# Altium schematic symbol library Janus.SchLib: 15 symbols
Pins are listed as number, name and electrical type; pins without a type are passive.

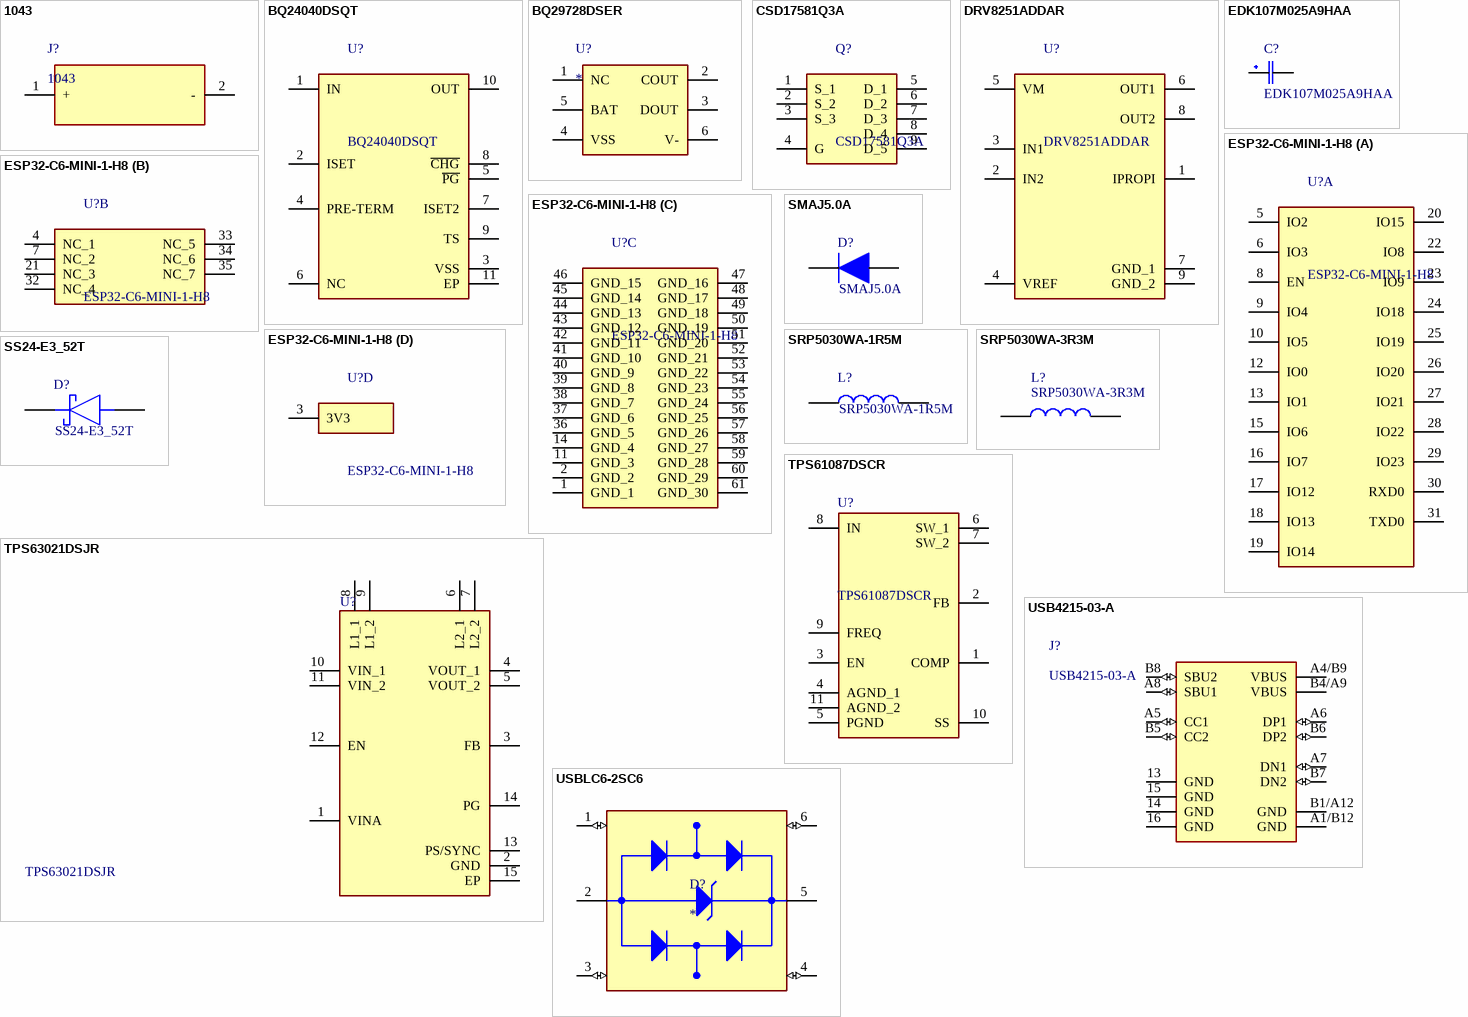
[diagram p0: symbols 1043 to USBLC6-2SC6]

## 1043
designator J?
Description; Manufacturer_Name: Keystone Electronics; Copyright: Copyright (C) 2026 Ultra Librarian. All rights reserved.; Manufacturer_Part_Number: 1043; RefDes: RefDes; Type: Type
footprint 1043_KEY
pins: 1 +, 2 -

## BQ24040DSQT
designator U?
1A 1-Cell Li-Ion Battery Charger WSON10 Texas Instruments BQ24040DSQT, Battery Charge Controller, 1000mA, 10-Pin SON; Geometry.Height: 0.8mm; Mouser Part Number: 595-BQ24040DSQT; Mouser Price/Stock: https://www.mouser.co.uk/ProductDetail/Texas-Instruments/BQ24040DSQT?qs=c7TMWs5treRrgyn%2F898iNQ%3D%3D; Manufacturer_Name: Texas Instruments; Manufacturer_Part_Number: BQ24040DSQT; Datasheet Link: http://www.ti.com/lit/ds/symlink/bq24040.pdf
footprint SON40P200X200X80-11N
pins: 1 IN, 2 ISET, 3 VSS, 4 PRE-TERM, 5 ~{PG}, 6 NC, 7 ISET2, 8 ~{CHG}, 9 TS, 10 OUT, 11 EP

## BQ29728DSER
designator U?
PCM IC; Manufacturer_Name: Texas Instruments; Manufacturer_Part_Number: BQ29707DSET; Datasheet Link: http://www.ti.com/lit/ds/symlink/bq2970.pdf; Height: 0.8mm; Mouser Part Number: 595-BQ29707DSET; Mouser Price/Stock: https://www.mouser.co.uk/ProductDetail/Texas-Instruments/BQ29707DSET?qs=7z%252BmIopC6%2FK8PFHAGER5Bg%3D%3D; Arrow Part Number: BQ29707DSET; Arrow Price/Stock: https://www.arrow.com/en/products/bq29707dset/texas-instruments.html?utm_currency=USD&region=nac
footprint TPS610985DSET
pins: 1 NC, 2 COUT, 3 DOUT, 4 VSS, 5 BAT, 6 V-

## CSD17581Q3A
designator Q?
30-V, N channel NexFET power MOSFET, single SON 3 mm x 3 mm, 4.7 mOhm; Manufacturer_Name: Texas Instruments; Geometry.Height: 0.9mm; Mouser Part Number: 595-CSD17581Q3A; Mouser Price/Stock: https://www.mouser.co.uk/ProductDetail/Texas-Instruments/CSD17581Q3A?qs=%2FP2Ij7fVdhEBu0ceoVBClg%3D%3D; Manufacturer_Part_Number: CSD17581Q3A; Datasheet Link: https://www.ti.com/product/CSD17581Q3A?utm_source=google&utm_medium=cpc&utm_campaign=app-null-null-GPN_EN-cpc-pf-google-soas_en_cons&utm_content=CSD17581Q3A&ds_k=CSD17581Q3A&DCM=yes&gclsrc=aw.ds&gad_source=1&gad_campaignid=8753799319&gbraid=0AAAAAC068F0J1
footprint CSD17581Q3A
pins: 1 S_1, 2 S_2, 3 S_3, 4 G, 5 D_1, 6 D_2, 7 D_3, 8 D_4, 9 D_5

## DRV8251ADDAR
designator U?
Motor Drives 48-V, 3.5-A H bridge motor driver with current regulation and current sense feedback; Manufacturer_Name: Texas Instruments; Geometry.Height: 1.7mm; Mouser Part Number: 595-DRV8251ADDAR; Mouser Price/Stock: https://www.mouser.co.uk/ProductDetail/Texas-Instruments/DRV8251ADDAR?qs=MyNHzdoqoQKQYZTe%252B1jFCw%3D%3D; Manufacturer_Part_Number: DRV8251ADDAR; Datasheet Link: https://www.arrow.com/en/products/drv8251addar/texas-instruments?region=nac
footprint SOIC127P600X170-9N
pins: 1 IPROPI, 2 IN2, 3 IN1, 4 VREF, 5 VM, 6 OUT1, 7 GND_1, 8 OUT2, 9 GND_2

## EDK107M025A9HAA
designator C?
Surface Mount, Aluminum Electrolytic; Manufacturer_Name: Yageo Group; Geometry.Height: 8mm; Mouser Part Number: 80-EDK107M025A9HAA; Mouser Price/Stock: https://www.mouser.co.uk/ProductDetail/KEMET/EDK107M025A9HAA?qs=T9vdlufmP8yf8os%252BKCOQGA%3D%3D; Manufacturer_Part_Number: EDK107M025A9HAA; Datasheet Link: https://www.yageogroup.com/content/datasheet/asset/file/KEM_A4001_EDK
footprint CAPAE660X800N
pins: 1, 2

## ESP32-C6-MINI-1-H8
designator U?
8 MB (Quad SPI) , 13.2  16.6  2.4 , 3.0 ~ 3.6 V , 2.4 GHz , 2412 ~ 2484 MHz , 40C ~ 105C; Manufacturer_Name: Espressif Systems; Geometry.Height: 2.55mm; Mouser Part Number: 356-ESP32C6MINI1H8; Mouser Price/Stock: https://www.mouser.co.uk/ProductDetail/Espressif-Systems/ESP32-C6-MINI-1-H8?qs=olJun0bQHM8q1UR%2FHSWi2A%3D%3D; Manufacturer_Part_Number: ESP32-C6-MINI-1-H8; Datasheet Link: https://www.mouser.ph/ProductDetail/Espressif-Systems/ESP32-C6-MINI-1-H8?qs=olJun0bQHM8q1UR%2FHSWi2A%3D%3D
footprint ESP32C6MINI1H8
part A pins: 5 IO2, 6 IO3, 8 EN, 9 IO4, 10 IO5, 12 IO0, 13 IO1, 15 IO6, 16 IO7, 17 IO12, 18 IO13, 19 IO14, 20 IO15, 22 IO8, 23 IO9, 24 IO18, 25 IO19, 26 IO20, 27 IO21, 28 IO22, 29 IO23, 30 RXD0, 31 TXD0
part B pins: 4 NC_1, 7 NC_2, 21 NC_3, 32 NC_4, 33 NC_5, 34 NC_6, 35 NC_7
part C pins: 1 GND_1, 2 GND_2, 11 GND_3, 14 GND_4, 36 GND_5, 37 GND_6, 38 GND_7, 39 GND_8, 40 GND_9, 41 GND_10, 42 GND_11, 43 GND_12, 44 GND_13, 45 GND_14, 46 GND_15, 47 GND_16, 48 GND_17, 49 GND_18, 50 GND_19, 51 GND_20, 52 GND_21, 53 GND_22, 54 GND_23, 55 GND_24, 56 GND_25, 57 GND_26, 58 GND_27, 59 GND_28, 60 GND_29, 61 GND_30
part D pins: 3 3V3

## SMAJ5.0A
designator D?
BOURNS - SMAJ5.0A - TVS Diode, TRANSZORB SMAJ Series, Unidirectional, 5 V, 9.2 V, DO-214AC (SMA), 2 Pins; Geometry.Height: 2.29mm; Mouser Part Number: 652-SMAJ5.0A; Mouser Price/Stock: https://www.mouser.co.uk/ProductDetail/Bourns/SMAJ5.0A?qs=A3H9pljuJ8RbLIvzFxDfUA%3D%3D; Manufacturer_Name: Bourns; Manufacturer_Part_Number: SMAJ5.0A; Datasheet Link: https://detail.tmall.com/item.htm?id=548354020241&ali_refid=a3_430583_1006:1109983619:N:3Uw9kZ3UMDT/QL57nh1fXA==:ab063b49c94624768a940a913313feb0&ali_trackid=1_ab063b49c94624768a940a913313feb0&spm=a230r.1.14.1
footprint DIOM5026X229N
pins: 1 K, 2 A

## SRP5030WA-1R5M
designator L?
Ind,5.5x5.25x2.8mm,1.5uH+/-20%,8.5A,shd; Manufacturer_Name: Bourns; Geometry.Height: 3mm; Mouser Part Number: 652-SRP5030WA-1R5M; Mouser Price/Stock: https://www.mouser.co.uk/ProductDetail/Bourns/SRP5030WA-1R5M?qs=9vOqFld9vZVU1hSpR6NGrg%3D%3D; Manufacturer_Part_Number: SRP5030WA-1R5M; Datasheet Link: https://g.componentsearchengine.com/Datasheets/0/17601778.pdf
footprint INDPM5552X300N
pins: 1, 2

## SRP5030WA-3R3M
designator L?
Ind,5.5x5.25x2.8mm,3.3uH+/-20%,6A,shd; Manufacturer_Name: Bourns; Geometry.Height: 3mm; Mouser Part Number: 652-SRP5030WA-3R3M; Mouser Price/Stock: https://www.mouser.co.uk/ProductDetail/Bourns/SRP5030WA-3R3M?qs=9vOqFld9vZVo7qWb%252BEg6NA%3D%3D; Manufacturer_Part_Number: SRP5030WA-3R3M; Datasheet Link: https://www.bourns.com/docs/Product-Datasheets/SRP5030WA.pdf
footprint INDPM5552X300N
pins: 1, 2

## SS24-E3_52T
designator D?
Schottky Diodes & Rectifiers 2.0 Amp 40 Volt; Manufacturer_Name: Vishay; Manufacturer_Part_Number: SS24-E3/52T; Geometry.Height: 2.44mm; Mouser Part Number: 625-SS24-E3; Mouser Price/Stock: https://www.mouser.co.uk/ProductDetail/Vishay-General-Semiconductor/SS24-E3-52T?qs=x2jpVgRnAtP8XbmaoIr%252Bng%3D%3D; Datasheet Link: https://www.vishay.com/docs/88748/ss22.pdf
footprint DIOM5436X244N
pins: 1 K, 2 A

## TPS61087DSCR
designator U?
Conv DC-DC 2.5V to 6V Non-Inv/Inv/Step Up/Step Down Single-Out 3V to 18.5V 3.2A 10-Pin WSON EP T/R; Manufacturer_Name: Texas Instruments; Geometry.Height: 0.8mm; Mouser Part Number: 595-TPS61087DSCR; Mouser Price/Stock: https://www.mouser.co.uk/ProductDetail/Texas-Instruments/TPS61087DSCR?qs=bS0R8qMSxJOWmsgAbsl9FQ%3D%3D; Manufacturer_Part_Number: TPS61087DSCR; Datasheet Link: http://www.ti.com/lit/gpn/tps61087
footprint SON50P300X300X80-11N-D
pins: 1 COMP, 2 FB, 3 EN, 4 AGND_1, 5 PGND, 6 SW_1, 7 SW_2, 8 IN, 9 FREQ, 10 SS, 11 AGND_2

## TPS63021DSJR
designator U?
High Efficiency Single Inductor Buck-Boost Converter with 4A Switch; Manufacturer_Name: Texas Instruments; Geometry.Height: 1mm; Mouser Part Number: 595-TPS63021DSJR; Mouser Price/Stock: https://www.mouser.co.uk/ProductDetail/Texas-Instruments/TPS63021DSJR?qs=C44r%252BX3hXgL5uT9uesn8fg%3D%3D; Manufacturer_Part_Number: TPS63021DSJR; Datasheet Link: http://www.ti.com/lit/gpn/tps63021
footprint SON50P300X400X100-15N-D
pins: 1 VINA, 2 GND, 3 FB, 4 VOUT_1, 5 VOUT_2, 6 L2_1, 7 L2_2, 8 L1_1, 9 L1_2, 10 VIN_1, 11 VIN_2, 12 EN, 13 PS/SYNC, 14 PG, 15 EP

## USB4215-03-A
designator J?
Description; Manufacturer_Name: Global Connector Technology; Copyright: Copyright (C) 2026 Ultra Librarian. All rights reserved.; Manufacturer_Part_Number: USB4215-03-A; RefDes: RefDes; Type: Type
footprint CONN_8p94X6p5X3p16_12L_GCC
pins: 13 GND (power), 14 GND (power), 15 GND (power), 16 GND (power), A1/B12 GND (power), A4/B9 VBUS, A5 CC1 (io), A6 DP1 (io), A7 DN1 (io), A8 SBU1 (io), B1/A12 GND (power), B4/A9 VBUS, B5 CC2 (io), B6 DP2 (io), B7 DN2 (io), B8 SBU2 (io)

## USBLC6-2SC6
designator D?
17V Clamp 5A (8/20Âµs) Ipp Tvs Diode Surface Mount SOT-23-6; MF: STMicroelectronics; MP: USBLC6-2SC6; Value: *; SnapEDA_Link: https://www.snapeda.com/parts/USBLC6-2SC6/STMicroelectronics/view-part/?ref=snap; Check_prices: https://www.snapeda.com/parts/USBLC6-2SC6/STMicroelectronics/view-part/?ref=eda; Purchase-URL: https://pricing.snapeda.com/search/part/USBLC6-2SC6/?ref=eda; Price: None; Availability: In Stock; Package: SOT-23-6 STMicroelectronics
footprint SOT95P280X145-6N
pins: 1 I/O1_IN (io), 2 GND (power), 3 I/O2_IN (io), 4 I/O2_OUT (io), 5 VBUS (power), 6 I/O1_OUT (io)